# Altium integrated library ICP-20100.IntLib: 1 symbol
Pins are listed as number, name and electrical type; pins without a type are passive.

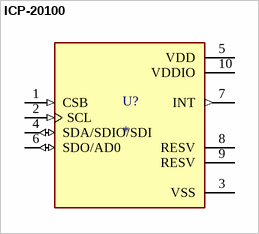
[diagram p0: symbol ICP-20100]

## ICP-20100
designator U?
Pressure Sensor 4.35PSI ~ 15.95PSI (30kPa ~ 110kPa) Absolute 20 b 10-VFLGA; MF: TDK InvenSense; MP: ICP-20100; SnapEDA_Link: https://www.snapeda.com/parts/ICP-20100/TDK/view-part/?ref=snap; Package: None; Value: *; Check_prices: https://www.snapeda.com/parts/ICP-20100/TDK/view-part/?ref=eda
footprint PQFN50P200X200X85-10N
pins: 1 CSB (in), 2 SCL (in), 3 VSS (power), 4 SDA/SDIO/SDI (io), 5 VDD (power), 6 SDO/AD0 (io), 7 INT (out), 8 RESV, 9 RESV, 10 VDDIO (power)